# Altium schematic symbol library 0060631C_Library.SchLib: 63 symbols
Pins are listed as number, name and electrical type; pins without a type are passive.

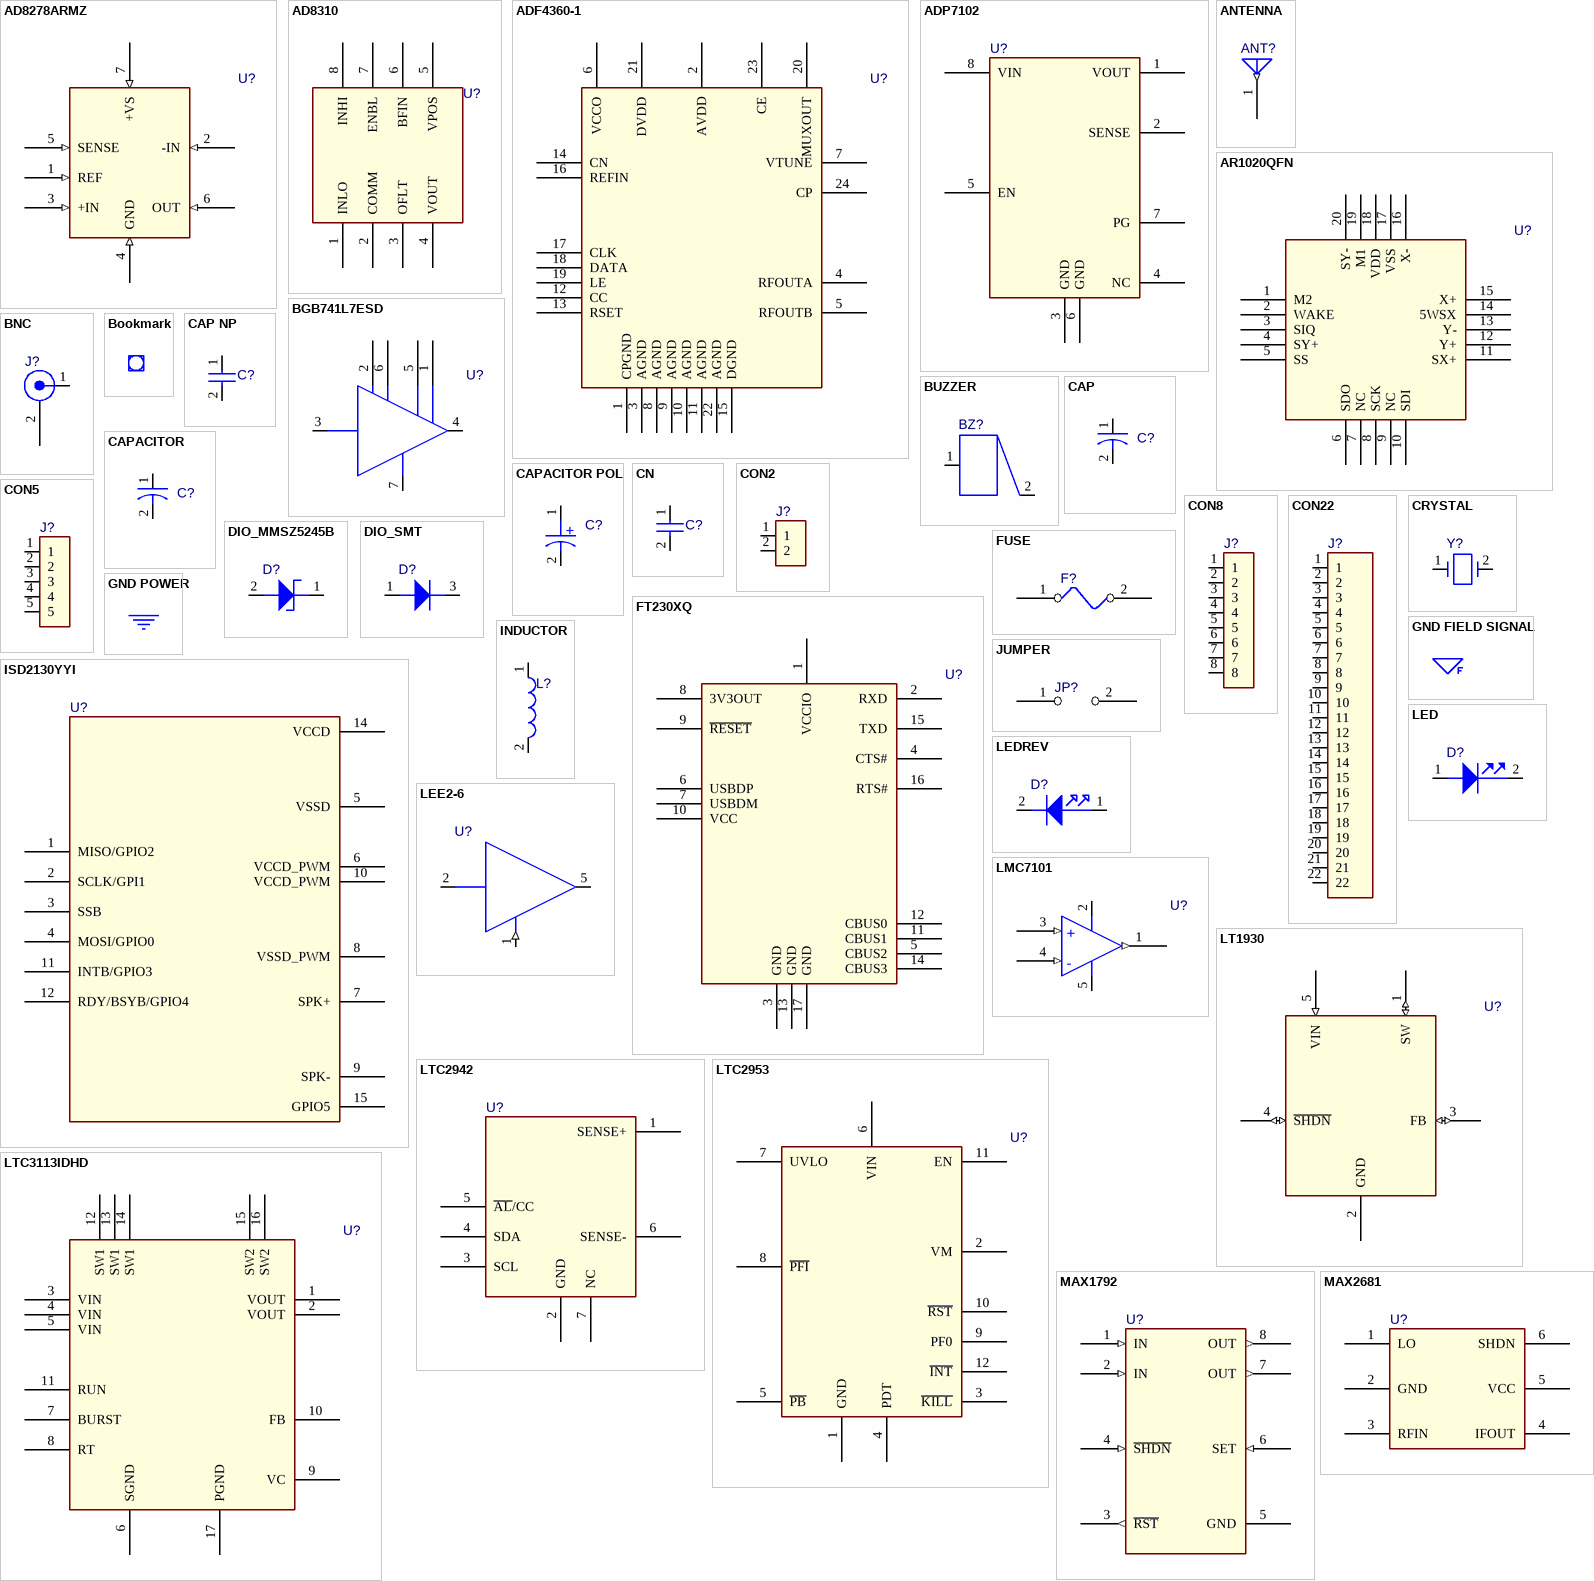
[diagram p0: symbols AD8278ARMZ to MAX2681]

## AD8278ARMZ
designator U?
pins: 1 REF (in), 2 -IN (in), 3 +IN (in), 4 GND (in), 5 SENSE (in), 6 OUT (in), 7 +VS (in)

## AD8310
designator U?
pins: 1 INLO, 2 COMM, 3 OFLT, 4 VOUT, 5 VPOS, 6 BFIN, 7 ENBL, 8 INHI

## ADF4360-1
designator U?
pins: 1 CPGND, 2 AVDD, 3 AGND, 4 RFOUTA, 5 RFOUTB, 6 VCCO, 7 VTUNE, 8 AGND, 9 AGND, 10 AGND, 11 AGND, 12 CC, 13 RSET, 14 CN, 15 DGND, 16 REFIN, 17 CLK, 18 DATA, 19 LE, 20 MUXOUT, 21 DVDD, 22 AGND, 23 CE, 24 CP

## ADP7102
designator U?
pins: 1 VOUT, 2 SENSE, 3 GND, 4 NC, 5 EN, 6 GND, 7 PG, 8 VIN, 9 GND (power) hidden to GND

## ANTENNA
designator ANT?
pins: 1 (out)

## AR1020QFN
designator U?
pins: 1 M2, 2 WAKE, 3 SIQ, 4 SY+, 5 SS, 6 SDO, 7 NC, 8 SCK, 9 NC, 10 SDI, 11 SX+, 12 Y+, 13 Y-, 14 5WSX, 15 X+, 16 X-, 17 VSS, 18 VDD, 19 M1, 20 SY-, 21 GND (power) hidden to GND

## BGB741L7ESD
designator U?
pins: 1 GND, 2 GND, 3 RFIN, 4 RFOUT, 5 GND, 6 GND, 7 GND

## BNC
designator J?
pins: 1 CENTER, 2 SHIELD

## Bookmark
designator *  (value not drawn)  (graphical)

## BUZZER
designator BZ?
pins: 1 A, 2 B

## CAP
designator C?
pins: 1, 2

## CAP NP
designator C?
pins: 1, 2

## CAPACITOR
designator C?
pins: 1, 2

## CAPACITOR POL
designator C?
pins: 1, 2
text: +

## CN
designator C?
pins: 1, 2

## CON2
designator J?
pins: 1, 2

## CON5
designator J?
pins: 1, 2, 3, 4, 5

## CON8
designator J?
pins: 1, 2, 3, 4, 5, 6, 7, 8

## CON22
designator J?
pins: 1, 2, 3, 4, 5, 6, 7, 8, 9, 10, 11, 12, 13, 14, 15, 16, 17, 18, 19, 20, 21, 22

## CRYSTAL
designator Y?
pins: 1, 2

## DIO_MMSZ5245B
designator D?
pins: 1 CATHODE, 2 ANODE

## DIO_SMT
designator D?
pins: 1 ANODE, 3 CATHODE

## FT230XQ
designator U?
pins: 1 VCCIO, 2 RXD, 3 GND, 4 CTS#, 5 CBUS2, 6 USBDP, 7 USBDM, 8 3V3OUT, 9 ~{RESET}, 10 VCC, 11 CBUS1, 12 CBUS0, 13 GND, 14 CBUS3, 15 TXD, 16 RTS#, 17 GND

## FUSE
designator F?
pins: 1, 2

## GND FIELD SIGNAL
designator *  (value not drawn)  (graphical)
pins: FIELDGND (power) hidden to FIELDGND

## GND POWER
designator *  (value not drawn)  (graphical)
pins: GND (power) hidden to GND

## INDUCTOR
designator L?
pins: 1, 2

## ISD2130YYI
designator U?
pins: 1 MISO/GPIO2, 2 SCLK/GPI1, 3 SSB, 4 MOSI/GPIO0, 5 VSSD, 6 VCCD_PWM, 7 SPK+, 8 VSSD_PWM, 9 SPK-, 10 VCCD_PWM, 11 INTB/GPIO3, 12 RDY/BSYB/GPIO4, 14 VCCD, 15 GPIO5, 16 NC (power) hidden to NC, 17 NC (power) hidden to NC, 18 NC (power) hidden to NC, 19 NC (power) hidden to NC, 20 NC (power) hidden to NC

## JUMPER
designator JP?
pins: 1, 2

## LED
designator D?
pins: 1 ANODE, 2 CATHODE

## LEDREV
designator D?
pins: 1 ANODE, 2 CATHODE

## LEE2-6
designator U?
pins: 1 VCC (in), 2 DIN, 3 GND (power) hidden to GND, 4 GND (power) hidden to GND, 5 DOUT+, 6 GND (power) hidden to GND, 7 GND (power) hidden to GND

## LMC7101
designator U?
pins: 1 OUT (out), 2 V2, 3 + (in), 4 - (in), 5 V1

## LT1930
designator U?
pins: 1 SW (io), 2 GND, 3 FB (io), 4 ~{SHDN} (io), 5 VIN (in)

## LTC2942
designator U?
pins: 1 SENSE+, 2 GND, 3 SCL, 4 SDA, 5 ~{AL}/CC, 6 SENSE-, 7 NC

## LTC2953
designator U?
pins: 1 GND, 2 VM, 3 ~{KILL}, 4 PDT, 5 ~{PB}, 6 VIN, 7 UVLO, 8 ~{PFI}, 9 PF0, 10 ~{RST}, 11 EN, 12 ~{INT}

## LTC3113IDHD
designator U?
pins: 1 VOUT, 2 VOUT, 3 VIN, 4 VIN, 5 VIN, 6 SGND, 7 BURST, 8 RT, 9 VC, 10 FB, 11 RUN, 12 SW1, 13 SW1, 14 SW1, 15 SW2, 16 SW2, 17 PGND

## MAX1792
designator U?
pins: 1 IN (in), 2 IN (in), 3 ~{RST} (out), 4 ~{SHDN} (in), 5 GND, 6 SET (in), 7 OUT (out), 8 OUT (out)

## MAX2681
designator U?
pins: 1 LO, 2 GND, 3 RFIN, 4 IFOUT, 5 VCC, 6 SHDN

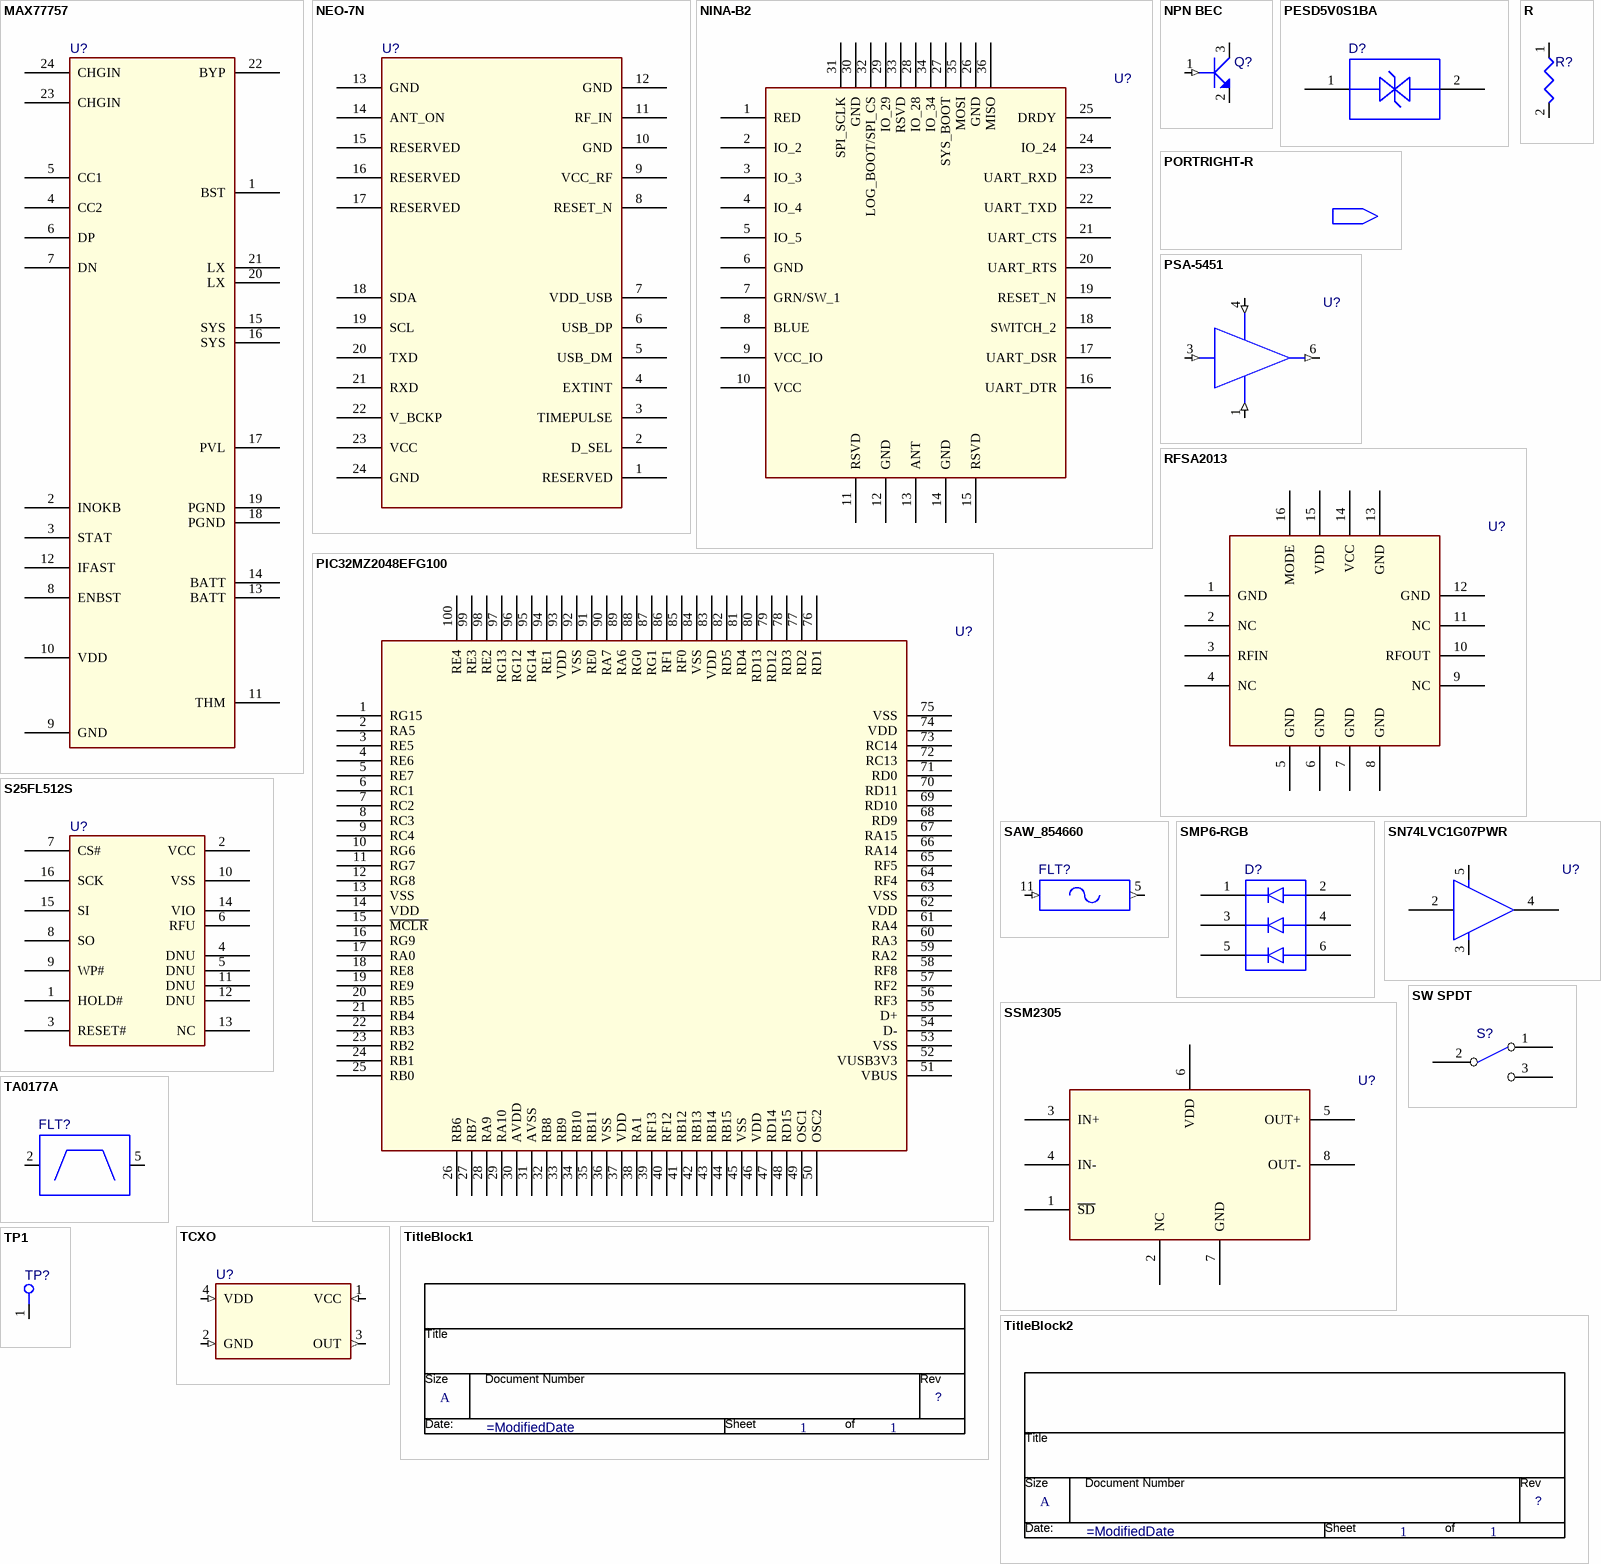
[diagram p1: symbols MAX77757 to TP1]

## MAX77757
designator U?
pins: 1 BST, 2 INOKB, 3 STAT, 4 CC2, 5 CC1, 6 DP, 7 DN, 8 ENBST, 9 GND, 10 VDD, 11 THM, 12 IFAST, 13 BATT, 14 BATT, 15 SYS, 16 SYS, 17 PVL, 18 PGND, 19 PGND, 20 LX, 21 LX, 22 BYP, 23 CHGIN, 24 CHGIN

## NEO-7N
designator U?
pins: 1 RESERVED, 2 D_SEL, 3 TIMEPULSE, 4 EXTINT, 5 USB_DM, 6 USB_DP, 7 VDD_USB, 8 RESET_N, 9 VCC_RF, 10 GND, 11 RF_IN, 12 GND, 13 GND, 14 ANT_ON, 15 RESERVED, 16 RESERVED, 17 RESERVED, 18 SDA, 19 SCL, 20 TXD, 21 RXD, 22 V_BCKP, 23 VCC, 24 GND

## NINA-B2
designator U?
pins: 1 RED, 2 IO_2, 3 IO_3, 4 IO_4, 5 IO_5, 6 GND, 7 GRN/SW_1, 8 BLUE, 9 VCC_IO, 10 VCC, 11 RSVD, 12 GND, 13 ANT, 14 GND, 15 RSVD, 16 UART_DTR, 17 UART_DSR, 18 SWITCH_2, 19 RESET_N, 20 UART_RTS, 21 UART_CTS, 22 UART_TXD, 23 UART_RXD, 24 IO_24, 25 DRDY, 26 GND, 27 SYS_BOOT, 28 IO_28, 29 IO_29, 30 GND, 31 SPI_SCLK, 32 LOG_BOOT/SPI_CS, 33 RSVD, 34 IO_34, 35 MOSI, 36 MISO, 37 GND (power) hidden to GND, 38 GND (power) hidden to GND, 39 GND (power) hidden to GND, 40 GND (power) hidden to GND, 41 GND (power) hidden to GND, 42 GND (power) hidden to GND, 43 GND (power) hidden to GND, 44 GND (power) hidden to GND, 45 GND (power) hidden to GND, 46 GND (power) hidden to GND, 47 GND (power) hidden to GND, 48 GND (power) hidden to GND

## NPN BEC
designator Q?
pins: 1 BASE (in), 2 EMITTER, 3 COLLECTOR

## PESD5V0S1BA
designator D?
pins: 1, 2

## PIC32MZ2048EFG100
designator U?
pins: 1 RG15, 2 RA5, 3 RE5, 4 RE6, 5 RE7, 6 RC1, 7 RC2, 8 RC3, 9 RC4, 10 RG6, 11 RG7, 12 RG8, 13 VSS, 14 VDD, 15 ~{MCLR}, 16 RG9, 17 RA0, 18 RE8, 19 RE9, 20 RB5, 21 RB4, 22 RB3, 23 RB2, 24 RB1, 25 RB0, 26 RB6, 27 RB7, 28 RA9, 29 RA10, 30 AVDD, 31 AVSS, 32 RB8, 33 RB9, 34 RB10, 35 RB11, 36 VSS, 37 VDD, 38 RA1, 39 RF13, 40 RF12, 41 RB12, 42 RB13, 43 RB14, 44 RB15, 45 VSS, 46 VDD, 47 RD14, 48 RD15, 49 OSC1, 50 OSC2, 51 VBUS, 52 VUSB3V3, 53 VSS, 54 D-, 55 D+, 56 RF3, 57 RF2, 58 RF8, 59 RA2, 60 RA3, 61 RA4, 62 VDD, 63 VSS, 64 RF4, 65 RF5, 66 RA14, 67 RA15, 68 RD9, 69 RD10, 70 RD11, 71 RD0, 72 RC13, 73 RC14, 74 VDD, 75 VSS, 76 RD1, 77 RD2, 78 RD3, 79 RD12, 80 RD13, 81 RD4, 82 RD5, 83 VDD, 84 VSS, 85 RF0, 86 RF1, 87 RG1, 88 RG0, 89 RA6, 90 RA7, 91 RE0, 92 VSS, 93 VDD, 94 RE1, 95 RG14, 96 RG12, 97 RG13, 98 RE2, 99 RE3, 100 RE4

## PORTRIGHT-R
designator *  (value not drawn)  (graphical)
pins: PORTRIGHT-R (in)

## PSA-5451
designator U?
pins: 1 GND (in), 2 GND (power) hidden to GND, 3 IN (in), 4 BIAS (in), 5 GND (power) hidden to GND, 6 OUT (out)

## R
designator R?
pins: 1, 2

## RFSA2013
designator U?
pins: 1 GND, 2 NC, 3 RFIN, 4 NC, 5 GND, 6 GND, 7 GND, 8 GND, 9 NC, 10 RFOUT, 11 NC, 12 GND, 13 GND, 14 VCC, 15 VDD, 16 MODE, 17 GND (power) hidden to GND

## S25FL512S
designator U?
pins: 1 HOLD#, 2 VCC, 3 RESET#, 4 DNU, 5 DNU, 6 RFU, 7 CS#, 8 SO, 9 WP#, 10 VSS, 11 DNU, 12 DNU, 13 NC, 14 VIO, 15 SI, 16 SCK

## SAW_854660
designator FLT?
pins: 1 GND (power) hidden to GND, 2 GND (power) hidden to GND, 3 GND (power) hidden to GND, 4 GND (power) hidden to GND, 5 OUT (out), 6 GND (power) hidden to GND, 7 GND (power) hidden to GND, 8 GND (power) hidden to GND, 9 GND (power) hidden to GND, 10 GND (power) hidden to GND, 11 IN (in), 12 GND (power) hidden to GND

## SMP6-RGB
designator D?
pins: 1, 2, 3, 4, 5, 6

## SN74LVC1G07PWR
designator U?
pins: 2 A, 3 GND, 4 Y, 5 VCC

## SSM2305
designator U?
pins: 1 ~{SD}, 2 NC, 3 IN+, 4 IN-, 5 OUT+, 6 VDD, 7 GND, 8 OUT-

## SW SPDT
designator S?
pins: 1 NC, 2 COMMON, 3 NO

## TA0177A
designator FLT?
pins: 1 GND (power) hidden to GND, 2 B, 3 GND (power) hidden to GND, 4 GND (power) hidden to GND, 5 E, 6 GND (power) hidden to GND

## TCXO
designator U?
pins: 1 VCC (in), 2 GND (in), 3 OUT (out), 4 VDD (in)

## TitleBlock1
designator *  Page Count: 1  Page Size: A  (hidden comment: *)  (graphical)
Page Number: 1; RevCode: ?; Page Create Date: March  8, 1995; Page Modify Date: =ModifiedDate
text: Title; Size; Document Number; Rev; Date:; Sheet; of

## TitleBlock2
designator *  Page Size: A  Page Number: 1  (hidden comment: *)  (graphical)
Page Create Date: March  8, 1995; RevCode: ?; Page Count: 1; Page Modify Date: =ModifiedDate
text: Title; Size; Document Number; Rev; Date:; Sheet; of

## TP1
designator TP?
pins: 1

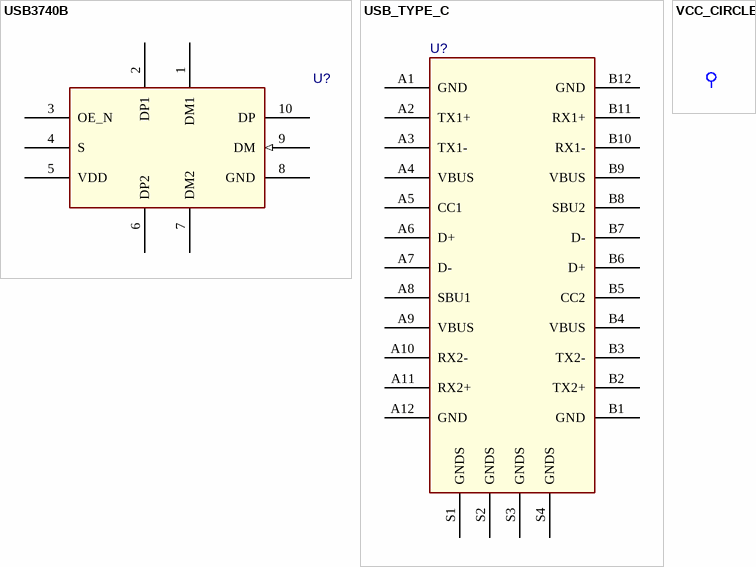
[diagram p2: symbols USB3740B to VCC_CIRCLE]

## USB3740B
designator U?
pins: 1 DM1, 2 DP1, 3 OE_N, 4 S, 5 VDD, 6 DP2, 7 DM2, 8 GND, 9 DM (in), 10 DP

## USB_TYPE_C
designator U?
pins: A1 GND, A2 TX1+, A3 TX1-, A4 VBUS, A5 CC1, A6 D+, A7 D-, A8 SBU1, A9 VBUS, A10 RX2-, A11 RX2+, A12 GND, B1 GND, B2 TX2+, B3 TX2-, B4 VBUS, B5 CC2, B6 D+, B7 D-, B8 SBU2, B9 VBUS, B10 RX1-, B11 RX1+, B12 GND, S1 GNDS, S2 GNDS, S3 GNDS, S4 GNDS

## VCC_CIRCLE
designator *  (value not drawn)  (graphical)
pins: $PIN0 (power) hidden to $PIN0